# Altium footprint library Connector-PH.PcbLib: 69 footprints (part 5 of 5)
Each footprint in its own frame and in the unit in brackets; x right, y up, seen from the top. Pads: shape width x height; smd on the part's side, far side on the other; paste and mask are expansions set on the pad; w line width, h text height; cw(c..) or ccw(c..) is an arc to the next point about the centre after c.
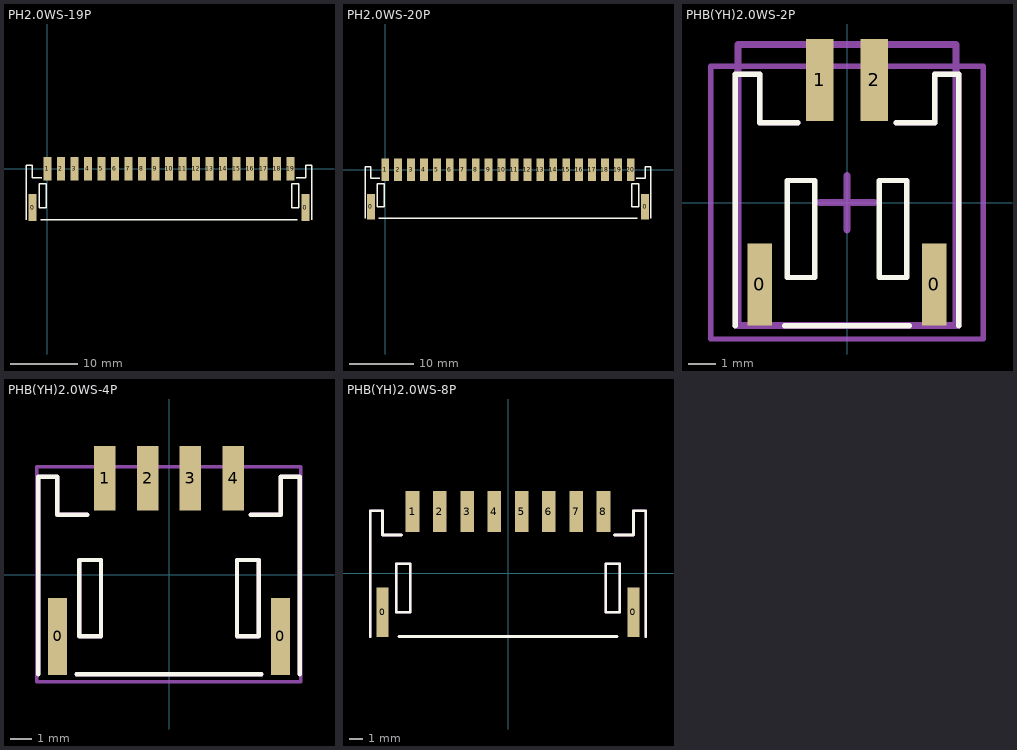
[diagram p4: the footprints below, top view; thin cyan lines are the x and y axes]

## PH2.0WS-19P [mm]
pads (21):
  rect 1.2x4 smd: 0(-2.2,-5.75) 0(38.2,-5.75)
  rect 1.2x3.5 smd: 1(0,0) 2(2,0) 3(4,0) 4(6,0) 5(8,0) 6(10,0) 7(12,0) 8(14,0) 9(16,0) 10(18,0) 11(20,0) 12(22,0) 13(24,0) 14(26,0) 15(28,0) 16(30,0) 17(32,0) 18(34,0) 19(36,0)
Top Overlay:
  lines w0.2: -3.096,-7.522 -3.096,0.479 -2.207,0.479 -2.207,-1.299 -0.81,-1.299 ; -1,-7.522 37,-7.522 ; 36.81,-1.299 38.207,-1.299 38.207,0.479 39.096,0.479 39.096,-7.522 ; -1.191,-5.744 -1.191,-2.188 -0.175,-2.188 -0.175,-5.744 -1.191,-5.744 ; 36.175,-5.744 36.175,-2.188 37.191,-2.188 37.191,-5.744 36.175,-5.744

## PH2.0WS-20P [mm]
pads (22):
  rect 1.2x4 smd: 0(-2.2,-5.75) 0(40.2,-5.75)
  rect 1.2x3.5 smd: 1(0,0) 2(2,0) 3(4,0) 4(6,0) 5(8,0) 6(10,0) 7(12,0) 8(14,0) 9(16,0) 10(18,0) 11(20,0) 12(22,0) 13(24,0) 14(26,0) 15(28,0) 16(30,0) 17(32,0) 18(34,0) 19(36,0) 20(38,0)
Top Overlay:
  lines w0.2: -3.096,-7.522 -3.096,0.479 -2.207,0.479 -2.207,-1.299 -0.81,-1.299 ; -1,-7.522 39,-7.522 ; 38.81,-1.299 40.207,-1.299 40.207,0.479 41.096,0.479 41.096,-7.522 ; -1.191,-5.744 -1.191,-2.188 -0.175,-2.188 -0.175,-5.744 -1.191,-5.744 ; 38.175,-5.744 38.175,-2.188 39.191,-2.188 39.191,-5.744 38.175,-5.744

## PHB(YH)2.0WS-2P [mm] "BOOMELE(博穆精密) - HY-2P卧贴"
pads (4):
  rect 0.9x3 smd: 0(-3.2,-3) 0(3.2,-3)
  rect 1x3 smd: 1(-1,4.5) 2(1,4.5)
Top Overlay:
  lines w0.2: -4.092,-4.522 -4.092,4.7 -3.203,4.7 -3.203,2.922 -1.806,2.922 ; -2.286,-4.522 2.286,-4.522 ; 1.814,2.922 3.211,2.922 3.211,4.7 4.1,4.7 4.1,-4.522 ; -2.191,-2.744 -2.191,0.812 -1.175,0.812 -1.175,-2.744 -2.191,-2.744 ; 1.175,-2.744 1.175,0.812 2.191,0.812 2.191,-2.744 1.175,-2.744
Top Component Outline:
  lines w0.254: -4,-4.5 4,-4.5 4,5.8 -4,5.8 -4,-4.5
Top Component Center:
  lines w0.2: -1,0 1,0 ; 0,-1 0,1
  lines w0.254: -1,0 1,0 ; 0,-1 0,1
Top Value:
  text "'.Comment'" at -3.287,-0.443 h1.52
Top Designator:
  text "'.Designator'" at -4.362,-0.51 h1.52
Top Courtyard:
  lines w0.2: -5,-5 -5,5 5,5 5,-5 -5,-5
Top Assembly (Mech20):
  lines w0.2: -4.092,-4.522 -4.092,4.7 -3.203,4.7 -3.203,2.922 -1.806,2.922 ; -2.286,-4.522 2.286,-4.522 ; 1.814,2.922 3.211,2.922 3.211,4.7 4.1,4.7 4.1,-4.522
3D body "HY-2P-WS.step": height 5.3, standoff 0.1, extent -4,-4.5 4,5.8

## PHB(YH)2.0WS-4P [mm] "BOOMELE(博穆精密) - HY-4P卧贴"
pads (6):
  rect 0.9x3.6 smd: 0(-5.2,-2.875) 0(5.2,-2.875)
  rect 1x3 smd: 1(-3,4.5) 2(-1,4.5) 3(1,4.5) 4(3,4.5)
Top Overlay:
  lines w0.2: -6.1,-4.647 -6.1,4.575 -5.211,4.575 -5.211,2.797 -3.814,2.797 ; -4.318,-4.647 4.318,-4.647 ; 3.814,2.797 5.211,2.797 5.211,4.575 6.1,4.575 6.1,-4.647 ; -4.191,-2.869 -3.175,-2.869 -3.175,0.687 -4.191,0.687 -4.191,-2.869 ; 3.175,-2.869 4.191,-2.869 4.191,0.687 3.175,0.687 3.175,-2.869
Top Value:
  text "'.Comment'" at -2.478,-0.367 h1.14
Top Designator:
  text "'.Designator'" at -4.377,-0.621 h1.52
Top Courtyard:
  lines w0.152: -6.175,-4.999 6.144,-4.999 6.144,5.034 -6.175,5.034 -6.175,-4.999
Top Assembly (Mech20):
  lines w0.2: -6.1,-4.647 -6.1,4.575 -5.211,4.575 -5.211,2.797 -3.814,2.797 ; -4.318,-4.647 4.318,-4.647 ; 3.814,2.797 5.211,2.797 5.211,4.575 6.1,4.575 6.1,-4.647 ; -4.191,-2.869 -3.175,-2.869 -3.175,0.687 -4.191,0.687 -4.191,-2.869 ; 3.175,-2.869 4.191,-2.869 4.191,0.687 3.175,0.687 3.175,-2.869
3D body "PHB(YH)-4WS.step": height 5.2, standoff 0, extent -6.001,-4.7 6,5.6

## PHB(YH)2.0WS-8P [mm] "BOOMELE(博穆精密) - HY8PWBPZ"
pads (10):
  rect 0.9x3.6 smd: 0(-9.2,-2.875) 0(9.2,-2.875)
  rect 1x3 smd: 1(-7,4.5) 2(-5,4.5) 3(-3,4.5) 4(-1,4.5) 5(1,4.5) 6(3,4.5) 7(5,4.5) 8(7,4.5)
Top Overlay:
  lines w0.2: -10.1,-4.647 -10.1,4.575 -9.211,4.575 -9.211,2.797 -7.814,2.797 ; -8,-4.647 8,-4.647 ; 7.814,2.797 9.211,2.797 9.211,4.575 10.1,4.575 10.1,-4.647 ; -8.191,-2.869 -7.175,-2.869 -7.175,0.687 -8.191,0.687 -8.191,-2.869 ; 7.175,-2.869 8.191,-2.869 8.191,0.687 7.175,0.687 7.175,-2.869
Top Value:
  text "'.Comment'" at -2.578,-0.892 h1.14
Top Designator:
  text "'.Designator'" at -4.477,-1.146 h1.52
Top Assembly (Mech20):
  lines w0.2: -10.1,-4.647 -10.1,4.575 -9.211,4.575 -9.211,2.797 -7.814,2.797 ; -8,-4.647 8,-4.647 ; 7.814,2.797 9.211,2.797 9.211,4.575 10.1,4.575 10.1,-4.647 ; -8.191,-2.869 -7.175,-2.869 -7.175,0.687 -8.191,0.687 -8.191,-2.869 ; 7.175,-2.869 8.191,-2.869 8.191,0.687 7.175,0.687 7.175,-2.869
3D body "HY2.0WS-8P.step": height 5.2, standoff 0, extent -10.001,-4.7 10.001,5.4